# Altium footprint library Footprint-Lib-PhilsLab.PcbLib: 544 footprints (part 30 of 34)
Each footprint in its own frame and in the unit in brackets; x right, y up, seen from the top. Pads: shape width x height; smd on the part's side, far side on the other; paste and mask are expansions set on the pad; w line width, h text height; cw(c..) or ccw(c..) is an arc to the next point about the centre after c.
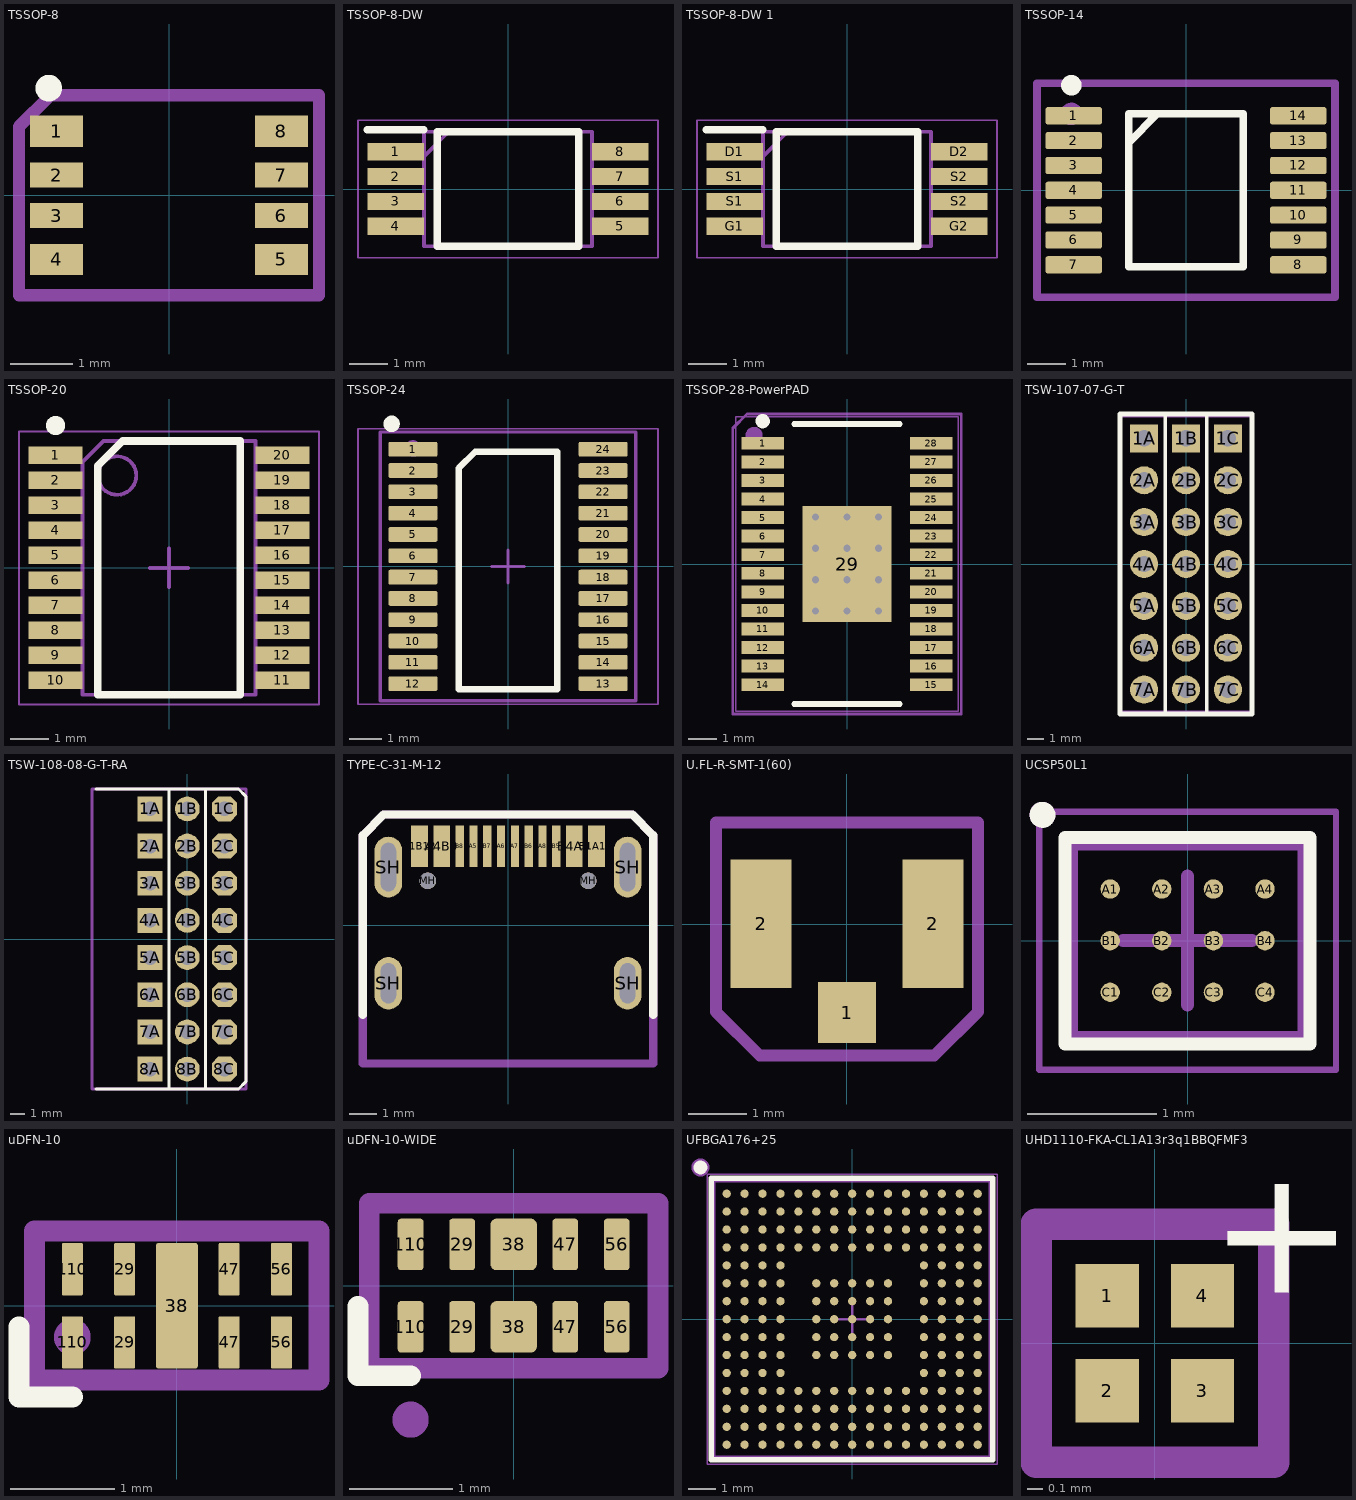
[diagram p29: the footprints below, top view; thin cyan lines are the x and y axes]

## TSSOP-8 [mm]
pads (8):
  rect 0.85x0.5 smd mask+0.07: 1(-1.8,1.025) 4(-1.8,-1.025) 5(1.8,-1.025) 8(1.8,1.025)
  rect 0.85x0.4 smd mask+0.07: 2(-1.8,0.325) 3(-1.8,-0.325) 6(1.8,-0.325) 7(1.8,0.325)
Top Overlay:
  circle w0.25: c-1.925,1.715 r0.088
Mechanical 13:
  lines w0.2: -2.4,-1.6 -2.4,0 -2.4,1.1 -1.9,1.6 2.4,1.6 2.4,-1.6 -2.4,-1.6
  text "'.Designator'" at -5.84,-0.925 h1
3D body "TSSPO8.step": height 0.86, standoff -0.06, extent -2.018,-1.5 2.006,1.5

## TSSOP-8-DW [mm]
pads (8):
  rect 1.475x0.45 smd mask+0.05: 1(-2.938,0.975) 2(-2.938,0.325) 3(-2.938,-0.325) 4(-2.938,-0.975) 5(2.938,-0.975) 6(2.938,-0.325) 7(2.938,0.325) 8(2.938,0.975)
Top Overlay:
  lines w0.2: -3.675,1.55 -2.2,1.55 ; -1.85,-1.5 1.85,-1.5 1.85,1.5 -1.85,1.5 -1.85,-1.5
Mechanical 13:
  lines w0.1: -2.2,0.85 -1.55,1.5 ; -2.2,-1.5 2.2,-1.5 2.2,1.5 -2.2,1.5 -2.2,-1.5
  text "'.Designator'" at -5.84,-0.925 h1
Mechanical 15:
  lines w0.05: -3.925,-1.8 3.925,-1.8 3.925,1.8 -3.925,1.8 -3.925,-1.8
3D body "M24C08-RDW6TP.stp": height 1.2, standoff 0, extent -3.2,-1.5 3.2,1.5

## TSSOP-8-DW 1 [mm]
pads (8):
  rect 1.475x0.45 smd mask+0.05: D1(-2.938,0.975) D2(2.938,0.975) G1(-2.938,-0.975) G2(2.938,-0.975) S1(-2.938,-0.325) S1(-2.938,0.325) S2(2.938,-0.325) S2(2.938,0.325)
Top Overlay:
  lines w0.2: -3.675,1.55 -2.2,1.55 ; -1.85,-1.5 1.85,-1.5 1.85,1.5 -1.85,1.5 -1.85,-1.5
Mechanical 13:
  lines w0.1: -2.2,0.85 -1.55,1.5 ; -2.2,-1.5 2.2,-1.5 2.2,1.5 -2.2,1.5 -2.2,-1.5
  text "'.Designator'" at -5.84,-0.925 h1
Mechanical 15:
  lines w0.05: -3.925,-1.8 3.925,-1.8 3.925,1.8 -3.925,1.8 -3.925,-1.8
3D body "M24C08-RDW6TP.stp": height 1.2, standoff 0, extent -3.2,-1.5 3.2,1.5

## TSSOP-14 [mm]
pads (14):
  rrect25% 1.475x0.45 smd mask+0.05: 1(-2.938,1.95) 2(-2.938,1.3) 3(-2.938,0.65) 4(-2.938,0) 5(-2.938,-0.65) 6(-2.938,-1.3) 7(-2.938,-1.95) 8(2.938,-1.95) 9(2.938,-1.3) 10(2.938,-0.65) 11(2.938,0) 12(2.938,0.65) 13(2.938,1.3) 14(2.938,1.95)
Top Overlay:
  circle w0.3: c-3,2.75 r0.118
  lines w0.2: -0.75,2 -1.5,1.25 ; -1.5,1.25 -1.5,1.25 ; -1.5,-2 1.5,-2 1.5,2 -1.5,2 -1.5,-2
Mechanical 13:
  circle w0.3: c-3,2 r0.141
  lines w0.2: -3.9,-2.8 3.9,-2.8 3.9,2.8 -3.9,2.8 -3.9,-2.8
  text "'.Designator'" at -5.84,-0.925 h1
Mechanical 15:
  lines w0.05: -3.925,-2.8 3.925,-2.8 3.925,2.8 -3.925,2.8 -3.925,-2.8
3D body "LM339PW.stp": height 1.13, standoff 0, extent -3.2,-2.5 3.2,2.5

## TSSOP-20 [mm] "TSOP, 20-Leads, Body 6,50x4,40mm, Pitch 0,65mm, IPC Medium Density"
height 1.2
pads (20):
  rect 1.4x0.45 smd mask+0.15: 1(-2.95,2.925) 2(-2.95,2.275) 3(-2.95,1.625) 4(-2.95,0.975) 5(-2.95,0.325) 6(-2.95,-0.325) 7(-2.95,-0.975) 8(-2.95,-1.625) 9(-2.95,-2.275) 10(-2.95,-2.925) 11(2.95,-2.925) 12(2.95,-2.275) 13(2.95,-1.625) 14(2.95,-0.975) 15(2.95,-0.325) 16(2.95,0.325) 17(2.95,0.975) 18(2.95,1.625) 19(2.95,2.275) 20(2.95,2.925)
Top Overlay:
  circle w0.25: c-2.95,3.7 r0.125
  lines w0.2: -1.85,-3.3 -1.85,2.65 -1.2,3.3 1.85,3.3 1.85,-3.3 -1.85,-3.3
Mechanical 13:
  circle w0.1: c-1.35,2.4 r0.5
  lines w0.1: -2.25,-3.3 -2.25,2.75 -1.7,3.3 2.25,3.3 2.25,-3.3 -2.25,-3.3
  text "'.Designator'" at -5.815,-0.9 h1
Mechanical 15:
  lines w0.05: -3.9,-3.55 3.9,-3.55 3.9,3.55 -3.9,3.55 -3.9,-3.55
  lines w0.1: -0.5,0 0.5,0 ; 0,-0.5 0,0.5
3D body "TSSOP-20.step": height 1.2, standoff 0, extent -3.2,-3.3 3.2,3.3

## TSSOP-24 [mm]
height 1.2
pads (24):
  rrect25% 1.5x0.45 smd mask+0.13: 1(-2.9,3.575) 2(-2.9,2.925) 3(-2.9,2.275) 4(-2.9,1.625) 5(-2.9,0.975) 6(-2.9,0.325) 7(-2.9,-0.325) 8(-2.9,-0.975) 9(-2.9,-1.625) 10(-2.9,-2.275) 11(-2.9,-2.925) 12(-2.9,-3.575) 13(2.9,-3.575) 14(2.9,-2.925) 15(2.9,-2.275) 16(2.9,-1.625) 17(2.9,-0.975) 18(2.9,-0.325) 19(2.9,0.325) 20(2.9,0.975) 21(2.9,1.625) 22(2.9,2.275) 23(2.9,2.925) 24(2.9,3.575)
Top Overlay:
  circle w0.25: c-3.55,4.35 r0.125
  lines w0.2: -1.5,-3.75 -1.5,3 -1,3.5 1.5,3.5 1.5,-3.75 -1.5,-3.75
Mechanical 13:
  circle w0.25: c-2.9,3.6 r0.125
  lines w0.1: -3.9,-4.1 -3.9,4.1 3.9,4.1 3.9,-4.1 -3.9,-4.1
  text "'.Designator'" at -7.315,-2.4 h1
Mechanical 15:
  lines w0.05: -4.575,-4.2 -4.575,4.2 4.575,4.2 4.575,-4.2 -4.575,-4.2
  lines w0.1: -0.5,0 0.5,0 ; 0,-0.5 0,0.5
3D body "TSSOP-24.step": height 1.21, standoff 0.01, extent -3.275,-3.95 3.275,3.95

## TSSOP-28-PowerPAD [mm] "TSOP, 28-Leads, Body 9.70x4.40mm, Pitch 0.65mm, Thermal Pad 4.05x3.10mm, IPC Medium Density"
height 1.2
pads (29):
  rect 1.5x0.45 smd: 1(-2.95,4.225) 2(-2.95,3.575) 3(-2.95,2.925) 4(-2.95,2.275) 5(-2.95,1.625) 6(-2.95,0.975) 7(-2.95,0.325) 8(-2.95,-0.325) 9(-2.95,-0.975) 10(-2.95,-1.625) 11(-2.95,-2.275) 12(-2.95,-2.925) 13(-2.95,-3.575) 14(-2.95,-4.225) 15(2.95,-4.225) 16(2.95,-3.575) 17(2.95,-2.925) 18(2.95,-2.275) 19(2.95,-1.625) 20(2.95,-0.975) 21(2.95,-0.325) 22(2.95,0.325) 23(2.95,0.975) 24(2.95,1.625) 25(2.95,2.275) 26(2.95,2.925) 27(2.95,3.575) 28(2.95,4.225)
  rect 3.1x4.05 smd: 29(0,0)
via 1.1,-1.65 diameter 0.6 hole 0.25
via 0,-1.65 diameter 0.6 hole 0.25
via -1.1,-1.65 diameter 0.6 hole 0.25
via 1.1,-0.55 diameter 0.6 hole 0.25
via 0,-0.55 diameter 0.6 hole 0.25
via -1.1,-0.55 diameter 0.6 hole 0.25
via 1.1,0.55 diameter 0.6 hole 0.25
via 0,0.55 diameter 0.6 hole 0.25
via -1.1,0.55 diameter 0.6 hole 0.25
via 1.1,1.65 diameter 0.6 hole 0.25
via 0,1.65 diameter 0.6 hole 0.25
via -1.1,1.65 diameter 0.6 hole 0.25
Top Overlay:
  circle w0.25: c-2.95,5 r0.125
  lines w0.2: -1.85,-4.9 1.85,-4.9 ; -1.85,4.9 1.85,4.9
Mechanical 13:
  circle w0.3: c-3.25,4.5 r0.15
  lines w0.1: -4,-5.25 -4,4.75 -3.5,5.25 4,5.25 4,-5.25 -4,-5.25
  text "'.Designator'" at -5.665,-0.417 h1
Mechanical 15:
  lines w0.05: -3.9,-5.15 3.9,-5.15 3.9,5.15 -3.9,5.15 -3.9,-5.15
  lines w0.1: -0.5,0 0.5,0 ; 0,-0.5 0,0.5
3D body "TSSOP-28-PowerPAD.step": height 1.2, standoff 0, extent -3.2,-4.9 3.2,4.9

## TSW-107-07-G-T [mm]
pads (21):
  rect 1.7x1.7 hole 1: 1A(-2.54,7.62) 1B(0,7.62) 1C(2.54,7.62)
  round 1.7 hole 1: 2A(-2.54,5.08) 2B(0,5.08) 2C(2.54,5.08) 3A(-2.54,2.54) 3B(0,2.54) 3C(2.54,2.54) 4A(-2.54,0) 4B(0,0) 4C(2.54,0) 5A(-2.54,-2.54) 5B(0,-2.54) 5C(2.54,-2.54) 6A(-2.54,-5.08) 6B(0,-5.08) 6C(2.54,-5.08) 7A(-2.54,-7.62) 7B(0,-7.62) 7C(2.54,-7.62)
Top Overlay:
  lines w0.2: -1.25,-9 -1.25,9 ; 1.25,-9 1.25,9
  lines w0.3: -4,-9.1 4,-9.1 4,9.1 -4,9.1 -4,-9.1
Mechanical 13:
  lines w0.2: -4,-9 4,-9 4,9 -4,9 -4,-9
  text "'.Designator'" at -5.84,-0.925 h1
3D body "TSW-107-07-G-T.stp": height 8.39, standoff -2.53, extent -3.81,-8.89 3.81,8.89

## TSW-108-08-G-T-RA [mm]
pads (24):
  rect 1.7x1.7 hole 1: 1A(-2.54,8.89) 2A(-2.54,6.35) 3A(-2.54,3.81) 4A(-2.54,1.27) 5A(-2.54,-1.27) 6A(-2.54,-3.81) 7A(-2.54,-6.35) 8A(-2.54,-8.89)
  round 1.7 hole 1: 1B(0,8.89) 2B(0,6.35) 3B(0,3.81) 4B(0,1.27) 5B(0,-1.27) 6B(0,-3.81) 7B(0,-6.35) 8B(0,-8.89)
  oct 1.7x1.7 hole 1: 1C(2.54,8.89) 2C(2.54,6.35) 3C(2.54,3.81) 4C(2.54,1.27) 5C(2.54,-1.27) 6C(2.54,-3.81) 7C(2.54,-6.35) 8C(2.54,-8.89)
Top Overlay:
  lines w0.2: -6.25,-10.25 3.5,-10.25 4,-9.75 4,9.75 3.5,10.25 -6.25,10.25 ; -1.25,-10.25 -1.25,10.25 ; 1.25,-10.25 1.25,10.25
Mechanical 13:
  lines w0.2: -6.5,-10.25 -6.5,10.25 4,10.25 4,-10.25 -6.5,-10.25
  text "PCB EDGE" at -6.65,-3.045 h0.5
  text "'.Designator'" at -5.84,-0.925 h1
3D body "TSW-108-08-F-T-RA.stp": height 8.14, standoff -2.27, extent -12.446,-10.16 2.858,10.16

## TYPE-C-31-M-12 [mm]
pads (18):
  rect 0.6x1.5 smd mask+0.07: A1B12(-3.2,2.85) B1A12(3.2,2.85)
  rect 0.6x1.5 smd mask+0.14: A4B9(-2.4,2.85) B4A9(2.4,2.85)
  rect 0.3x1.5 smd mask+0.14: A5(-1.25,2.85) A6(-0.25,2.85) A7(0.25,2.85) A8(1.25,2.85) B5(1.75,2.85) B6(0.75,2.85) B7(-0.75,2.85) B8(-1.75,2.85)
  round 0.6 hole 0.6 unplated mask+0.3: MH(-2.9,1.6) MH(2.9,1.6)
  oval 1x1.9 hole 0.55 slot 1.45 at 90 deg mask+0.05: SH(-4.325,-2.1) SH(4.325,-2.1)
  oval 1x2.2 hole 0.55 slot 1.75 at 90 deg mask+0.05: SH(-4.325,2.1) SH(4.325,2.1)
Top Overlay:
  lines w0.3: -5.25,-3.25 -5.25,3.25 -4.5,4 4.5,4 5.25,3.25 5.25,-3.25
Mechanical 13:
  lines w0.3: -5.25,-5 -5.25,2.75 -5.25,3.25 -4.5,4 4.5,4 5.25,3.25 5.25,-5 -5.25,-5
  text "'.Designator'" at -5.815,-0.9 h1
3D body "TYPE-C-31-M-12.STEP": height 3.32, standoff -0.98, extent -4.47,-4.65 4.47,3.255

## U.FL-R-SMT-1(60) [mm]
pads (3):
  rect 1x1.05 smd mask+0.07: 1(0,-1.512)
  rect 1.05x2.2 smd mask+0.07: 2(-1.475,0.013) 2(1.475,0.013)
Mechanical 13:
  lines w0.2: -2.25,-1.5 -1.5,-2.25 1.5,-2.25 2.25,-1.5 2.25,1.75 -2.25,1.75 -2.25,0 -2.25,-1.5
  text "'.Designator'" at -5.84,-0.925 h1
3D body "U.FL-R-SMT-1.stp": height 1.26, standoff 0.01, extent -1.5,-1.55 1.5,1.55

## UCSP50L1 [mm]
height 0.55
pads (12):
  round 0.15 smd mask+0.05: A1(-0.6,0.4) A2(-0.2,0.4) A3(0.2,0.4) A4(0.6,0.4) B1(-0.6,0) B2(-0.2,0) B3(0.2,0) B4(0.6,0) C1(-0.6,-0.4) C2(-0.2,-0.4) C3(0.2,-0.4) C4(0.6,-0.4)
Top Overlay:
  circle w0.1: c-1.125,0.975 r0.05
  lines w0.1: -0.95,-0.8 -0.95,0.8 0.95,0.8 0.95,-0.8 -0.95,-0.8
Mechanical 13:
  circle w0.1: c-1.125,0.976 r0.05
  lines w0.1: -0.9,-0.75 0.9,-0.75 0.9,0.75 -0.9,0.75 -0.9,-0.75
  text "'.Designator'" at -5.665,-0.417 h1
Mechanical 15:
  lines w0.05: -1.15,-1 1.15,-1 1.15,1 -1.15,1 -1.15,-1
  lines w0.1: -0.5,0 0.5,0 ; 0,-0.5 0,0.5
3D body "UCSP50L1.step": height 0.55, standoff 0, extent -0.9,-0.75 0.9,0.75

## uDFN-10 [mm]
pads (9):
  rrect10% 0.2x0.5 smd mask+0: 29(-0.5,-0.35) 29(-0.5,0.35) 47(0.5,-0.35) 47(0.5,0.35) 56(1,-0.35) 56(1,0.35) 110(-1,-0.35) 110(-1,0.35)
  rrect10% 0.4x1.2 smd mask+0: 38(0,0)
Top Overlay:
  lines w0.2: -1.51,-0.2 -1.51,-0.874 -1,-0.874
Mechanical 13:
  circle w0.25: c-1,-0.3 r0.05
  lines w0.2: -1.362,-0.711 1.359,-0.711 1.359,0.717 -1.362,0.717 -1.362,-0.711
  text "'.Designator'" at -5.84,-0.925 h1
3D body "uDFN-10.step": height 0.47, standoff 0.01, extent -1.25,-0.51 1.25,0.51

## uDFN-10-WIDE [mm]
pads (10):
  rrect25% 0.25x0.5 smd mask+0.02: 29(-0.5,-0.4) 29(-0.5,0.4) 47(0.5,-0.4) 47(0.5,0.4) 56(1,-0.4) 56(1,0.4) 110(-1,-0.4) 110(-1,0.4)
  rrect25% 0.45x0.5 smd mask+0.02: 38(0,-0.4) 38(0,0.4)
Top Overlay:
  lines w0.2: -1.51,-0.2 -1.51,-0.874 -1,-0.874
Mechanical 13:
  circle w0.25: c-1,-1.3 r0.05
  lines w0.2: -1.4,-0.8 1.4,-0.8 1.4,0.8 -1.4,0.8 -1.4,-0.8
  text "'.Designator'" at -5.84,-0.925 h1
3D body "uDFN-10.step": height 0.47, standoff 0.01, extent -1.25,-0.51 1.25,0.51

## UFBGA176+25 [mm]
height 0.6
pads (201):
  round 0.3 smd mask+0.07: A1(-4.55,4.55) A2(-3.9,4.55) A3(-3.25,4.55) A4(-2.6,4.55) A5(-1.95,4.55) A6(-1.3,4.55) A7(-0.65,4.55) A8(0,4.55) A9(0.65,4.55) A10(1.3,4.55) A11(1.95,4.55) A12(2.6,4.55) A13(3.25,4.55) A14(3.9,4.55) A15(4.55,4.55) B1(-4.55,3.9) B2(-3.9,3.9) B3(-3.25,3.9) B4(-2.6,3.9) B5(-1.95,3.9) B6(-1.3,3.9) B7(-0.65,3.9) B8(0,3.9) B9(0.65,3.9) B10(1.3,3.9) B11(1.95,3.9) B12(2.6,3.9) B13(3.25,3.9) B14(3.9,3.9) B15(4.55,3.9) C1(-4.55,3.25) C2(-3.9,3.25) C3(-3.25,3.25) C4(-2.6,3.25) C5(-1.95,3.25) C6(-1.3,3.25) C7(-0.65,3.25) C8(0,3.25) C9(0.65,3.25) C10(1.3,3.25) C11(1.95,3.25) C12(2.6,3.25) C13(3.25,3.25) C14(3.9,3.25) C15(4.55,3.25) D1(-4.55,2.6) D2(-3.9,2.6) D3(-3.25,2.6) D4(-2.6,2.6) D5(-1.95,2.6) D6(-1.3,2.6) D7(-0.65,2.6) D8(0,2.6) D9(0.65,2.6) D10(1.3,2.6) D11(1.95,2.6) D12(2.6,2.6) D13(3.25,2.6) D14(3.9,2.6) D15(4.55,2.6) E1(-4.55,1.95) E2(-3.9,1.95) E3(-3.25,1.95) E4(-2.6,1.95) E12(2.6,1.95) E13(3.25,1.95) E14(3.9,1.95) E15(4.55,1.95) F1(-4.55,1.3) F2(-3.9,1.3) F3(-3.25,1.3) F4(-2.6,1.3) F6(-1.3,1.3) F7(-0.65,1.3) F8(0,1.3) F9(0.65,1.3) F10(1.3,1.3) F12(2.6,1.3) F13(3.25,1.3) F14(3.9,1.3) F15(4.55,1.3) G1(-4.55,0.65) G2(-3.9,0.65) G3(-3.25,0.65) G4(-2.6,0.65) G6(-1.3,0.65) G7(-0.65,0.65) G8(0,0.65) G9(0.65,0.65) G10(1.3,0.65) G12(2.6,0.65) G13(3.25,0.65) G14(3.9,0.65) G15(4.55,0.65) H1(-4.55,0) H2(-3.9,0) H3(-3.25,0) H4(-2.6,0) H6(-1.3,0) H7(-0.65,0) H8(0,0) H9(0.65,0) H10(1.3,0) H12(2.6,0) H13(3.25,0) H14(3.9,0) H15(4.55,0) J1(-4.55,-0.65) J2(-3.9,-0.65) J3(-3.25,-0.65) J4(-2.6,-0.65) J6(-1.3,-0.65) J7(-0.65,-0.65) J8(0,-0.65) J9(0.65,-0.65) J10(1.3,-0.65) J12(2.6,-0.65) J13(3.25,-0.65) J14(3.9,-0.65) J15(4.55,-0.65) K1(-4.55,-1.3) K2(-3.9,-1.3) K3(-3.25,-1.3) K4(-2.6,-1.3) K6(-1.3,-1.3) K7(-0.65,-1.3) K8(0,-1.3) K9(0.65,-1.3) K10(1.3,-1.3) K12(2.6,-1.3) K13(3.25,-1.3) K14(3.9,-1.3) K15(4.55,-1.3) L1(-4.55,-1.95) L2(-3.9,-1.95) L3(-3.25,-1.95) L4(-2.6,-1.95) L12(2.6,-1.95) L13(3.25,-1.95) L14(3.9,-1.95) L15(4.55,-1.95) M1(-4.55,-2.6) M2(-3.9,-2.6) M3(-3.25,-2.6) M4(-2.6,-2.6) M5(-1.95,-2.6) M6(-1.3,-2.6) M7(-0.65,-2.6) M8(0,-2.6) M9(0.65,-2.6) M10(1.3,-2.6) M11(1.95,-2.6) M12(2.6,-2.6) M13(3.25,-2.6) M14(3.9,-2.6) M15(4.55,-2.6) N1(-4.55,-3.25) N2(-3.9,-3.25) N3(-3.25,-3.25) N4(-2.6,-3.25) N5(-1.95,-3.25) N6(-1.3,-3.25) N7(-0.65,-3.25) N8(0,-3.25) N9(0.65,-3.25) N10(1.3,-3.25) N11(1.95,-3.25) N12(2.6,-3.25) N13(3.25,-3.25) N14(3.9,-3.25) N15(4.55,-3.25) P1(-4.55,-3.9) P2(-3.9,-3.9) P3(-3.25,-3.9) P4(-2.6,-3.9) P5(-1.95,-3.9) P6(-1.3,-3.9) P7(-0.65,-3.9) P8(0,-3.9) P9(0.65,-3.9) P10(1.3,-3.9) P11(1.95,-3.9) P12(2.6,-3.9) P13(3.25,-3.9) P14(3.9,-3.9) P15(4.55,-3.9) R1(-4.55,-4.55) R2(-3.9,-4.55) R3(-3.25,-4.55) R4(-2.6,-4.55) R5(-1.95,-4.55) R6(-1.3,-4.55) R7(-0.65,-4.55) R8(0,-4.55) R9(0.65,-4.55) R10(1.3,-4.55) R11(1.95,-4.55) R12(2.6,-4.55) R13(3.25,-4.55) R14(3.9,-4.55) R15(4.55,-4.55)
Top Overlay:
  circle w0.25: c-5.5,5.5 r0.125
  lines w0.2: -5.1,-5.1 -5.1,5.1 5.1,5.1 5.1,-5.1 -5.1,-5.1
Mechanical 13:
  circle w0.5: c-5.5,5.5 r0.072
  lines w0.1: -5,-5 -5,5 5,5 5,-5 -5,-5
  text "'.Designator'" at -5.815,-0.9 h1
Mechanical 15:
  lines w0.05: -5.25,-5.25 -5.25,5.25 5.25,5.25 5.25,-5.25 -5.25,-5.25
  lines w0.1: -0.5,0 0.5,0 ; 0,-0.5 0,0.5
3D body "UFBGA176+25.step": height 0.6, standoff 0, extent -5,-5 5,5

## UHD1110-FKA-CL1A13r3q1BBQFMF3 [mm]
pads (4):
  rect 0.4x0.4 smd mask+0.07: 1(-0.3,0.3) 2(-0.3,-0.3) 3(0.3,-0.3) 4(0.3,0.3)
Top Overlay:
  text "+" at 0.342,0.319 h0.8
Mechanical 13:
  lines w0.2: -0.75,-0.75 -0.75,0.75 0.75,0.75 0.75,-0.75 -0.75,-0.75
  text "'.Designator'" at -5.148,-0.75 h0.8
  text "A" at 0.609,0.486 h0.5
3D body "UHD1110-FKA-CL1A13R3Q1BBQFMF3_eec.STEP": height 0.7, standoff 0, extent -0.5,-0.502 0.5,0.5